# Altium footprint library standard-case.PcbLib: 285 footprints (part 10 of 18)
Each footprint in its own frame and in the unit in brackets; x right, y up, seen from the top. Pads: shape width x height; smd on the part's side, far side on the other; paste and mask are expansions set on the pad; w line width, h text height; cw(c..) or ccw(c..) is an arc to the next point about the centre after c.
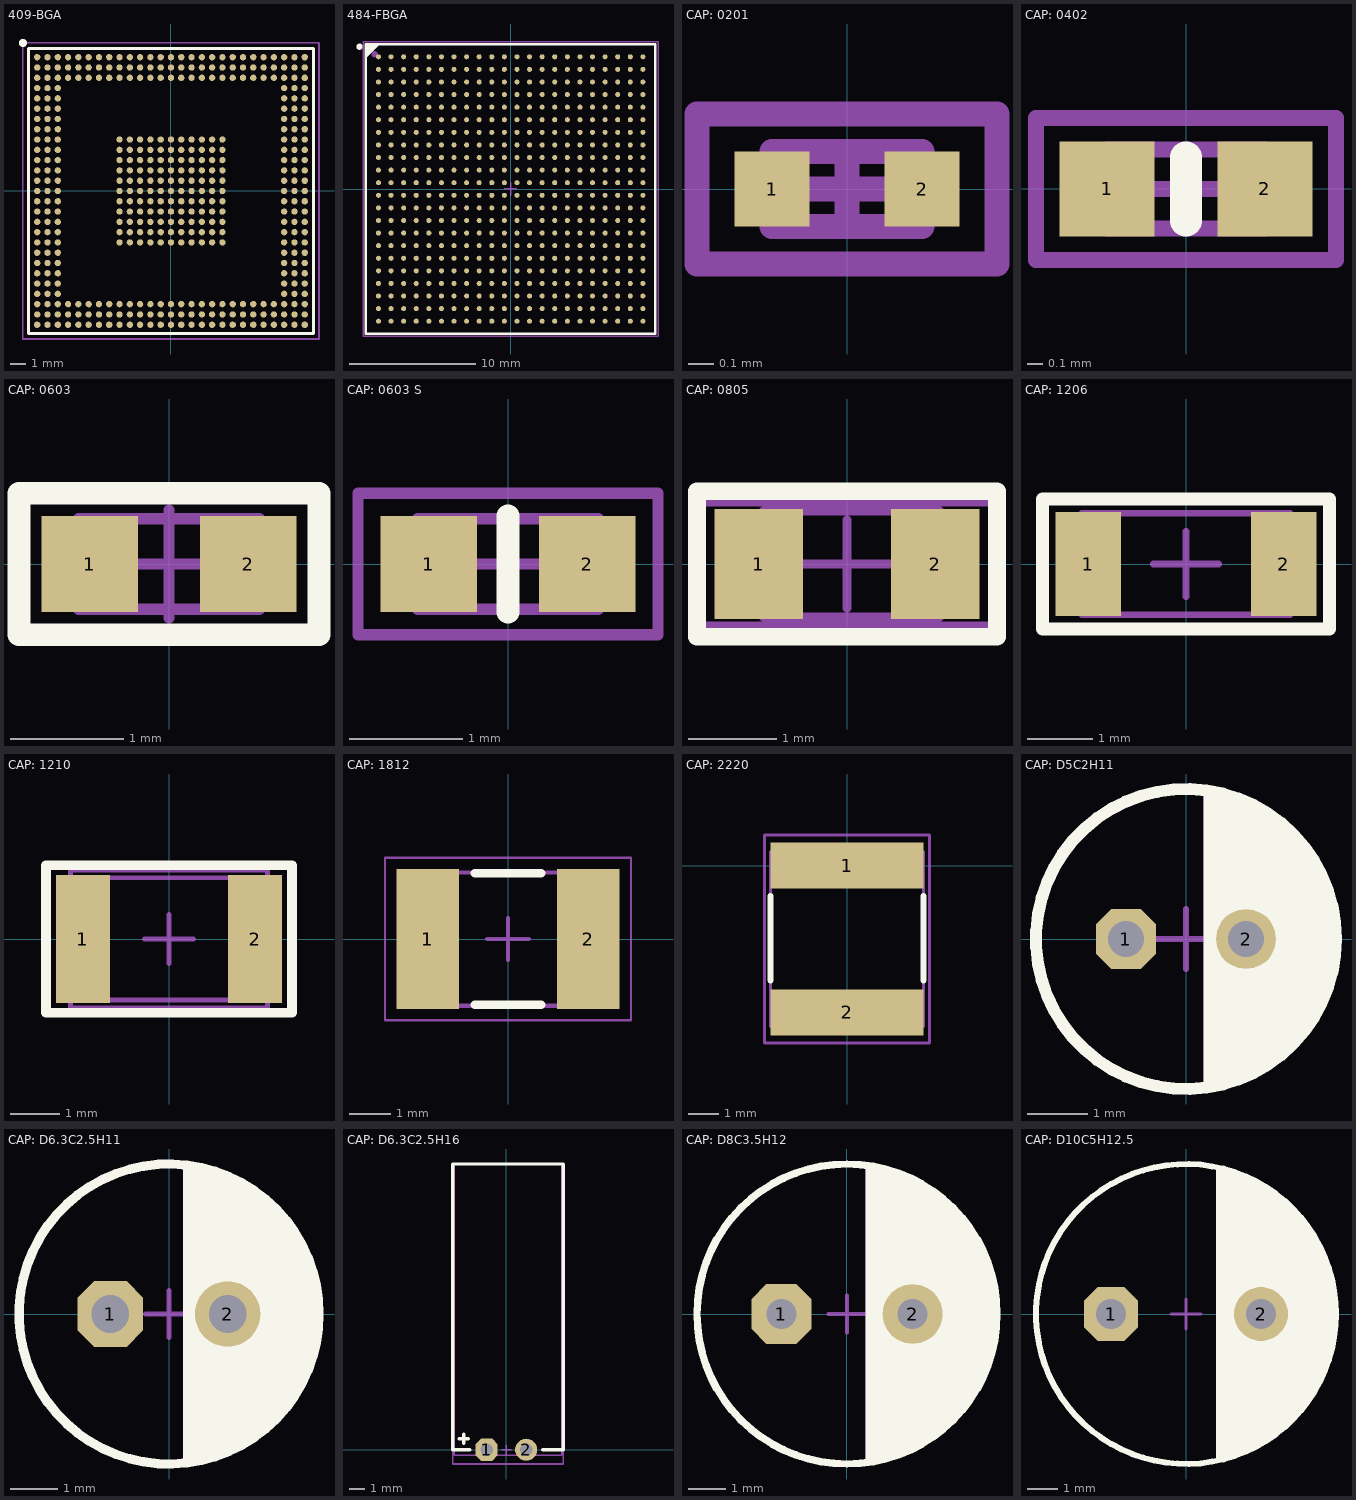
[diagram p9: the footprints below, top view; thin cyan lines are the x and y axes]

## 409-BGA [mm] "pitch 0.65 mm"
height 1.2
pads (410):
  round 0.4 smd: A1(-8.45,8.45) A2(-7.8,8.45) A3(-7.15,8.45) A4(-6.5,8.45) A5(-5.85,8.45) A6(-5.2,8.45) A7(-4.55,8.45) A8(-3.9,8.45) A9(-3.25,8.45) A10(-2.6,8.45) A11(-1.95,8.45) A12(-1.3,8.45) A13(-0.65,8.45) A14(0,8.45) A15(0.65,8.45) A16(1.3,8.45) A17(1.95,8.45) A18(2.6,8.45) A19(3.25,8.45) A20(3.9,8.45) A21(4.55,8.45) A22(5.2,8.45) A23(5.85,8.45) A24(6.5,8.45) A25(7.15,8.45) A26(7.8,8.45) A27(8.45,8.45) AA1(-8.45,-4.55) AA2(-7.8,-4.55) AA3(-7.15,-4.55) AA25(7.15,-4.55) AA26(7.8,-4.55) AA27(8.45,-4.55) AB1(-8.45,-5.2) AB2(-7.8,-5.2) AB3(-7.15,-5.2) AB25(7.15,-5.2) AB26(7.8,-5.2) AB27(8.45,-5.2) AC1(-8.45,-5.85) AC2(-7.8,-5.85) AC3(-7.15,-5.85) AC25(7.15,-5.85) AC26(7.8,-5.85) AC27(8.45,-5.85) AD1(-8.45,-6.5) AD2(-7.8,-6.5) AD3(-7.15,-6.5) AD25(7.15,-6.5) AD26(7.8,-6.5) AD27(8.45,-6.5) AE1(-8.45,-7.15) AE2(-7.8,-7.15) AE3(-7.15,-7.15) AE4(-6.5,-7.15) AE5(-5.85,-7.15) AE6(-5.2,-7.15) AE7(-4.55,-7.15) AE8(-3.9,-7.15) AE9(-3.25,-7.15) AE10(-2.6,-7.15) AE11(-1.95,-7.15) AE12(-1.3,-7.15) AE13(-0.65,-7.15) AE14(0,-7.15) AE15(0.65,-7.15) AE16(1.3,-7.15) AE17(1.95,-7.15) AE18(2.6,-7.15) AE19(3.25,-7.15) AE20(3.9,-7.15) AE21(4.55,-7.15) AE22(5.2,-7.15) AE23(5.85,-7.15) AE24(6.5,-7.15) AE25(7.15,-7.15) AE26(7.8,-7.15) AE27(8.45,-7.15) AF1(-8.45,-7.8) AF2(-7.8,-7.8) AF3(-7.15,-7.8) AF4(-6.5,-7.8) AF5(-5.85,-7.8) AF6(-5.2,-7.8) AF7(-4.55,-7.8) AF8(-3.9,-7.8) AF9(-3.25,-7.8) AF10(-2.6,-7.8) AF11(-1.95,-7.8) AF12(-1.3,-7.8) AF13(-0.65,-7.8) AF14(0,-7.8) AF15(0.65,-7.8) AF16(1.3,-7.8) AF17(1.95,-7.8) AF18(2.6,-7.8) AF19(3.25,-7.8) AF20(3.9,-7.8) AF21(4.55,-7.8) AF22(5.2,-7.8) AF23(5.85,-7.8) AF24(6.5,-7.8) AF25(7.15,-7.8) AF26(7.8,-7.8) AF27(8.45,-7.8) AG1(-8.45,-8.45) AG2(-7.8,-8.45) AG3(-7.15,-8.45) AG4(-6.5,-8.45) AG5(-5.85,-8.45) AG6(-5.2,-8.45) AG7(-4.55,-8.45) AG8(-3.9,-8.45) AG9(-3.25,-8.45) AG10(-2.6,-8.45) AG11(-1.95,-8.45) AG12(-1.3,-8.45) AG13(-0.65,-8.45) AG14(0,-8.45) AG15(0.65,-8.45) AG16(1.3,-8.45) AG17(1.95,-8.45) AG18(2.6,-8.45) AG19(3.25,-8.45) AG20(3.9,-8.45) AG21(4.55,-8.45) AG22(5.2,-8.45) AG23(5.85,-8.45) AG24(6.5,-8.45) AG25(7.15,-8.45) AG26(7.8,-8.45) AG27(8.45,-8.45) B1(-8.45,7.8) B2(-7.8,7.8) B3(-7.15,7.8) B4(-6.5,7.8) B5(-5.85,7.8) B6(-5.2,7.8) B7(-4.55,7.8) B8(-3.9,7.8) B9(-3.25,7.8) B10(-2.6,7.8) B11(-1.95,7.8) B12(-1.3,7.8) B13(-0.65,7.8) B14(0,7.8) B15(0.65,7.8) B16(1.3,7.8) B17(1.95,7.8) B18(2.6,7.8) B19(3.25,7.8) B20(3.9,7.8) B21(4.55,7.8) B22(5.2,7.8) B23(5.85,7.8) B24(6.5,7.8) B25(7.15,7.8) B26(7.8,7.8) B27(8.45,7.8) C1(-8.45,7.15) C2(-7.8,7.15) C3(-7.15,7.15) C4(-6.5,7.15) C5(-5.85,7.15) C6(-5.2,7.15) C7(-4.55,7.15) C8(-3.9,7.15) C9(-3.25,7.15) C10(-2.6,7.15) C11(-1.95,7.15) C12(-1.3,7.15) C13(-0.65,7.15) C14(0,7.15) C15(0.65,7.15) C16(1.3,7.15) C17(1.95,7.15) C18(2.6,7.15) C19(3.25,7.15) C20(3.9,7.15) C21(4.55,7.15) C22(5.2,7.15) C23(5.85,7.15) C24(6.5,7.15) C25(7.15,7.15) C26(7.8,7.15) C27(8.45,7.15) D1(-8.45,6.5) D2(-7.8,6.5) D3(-7.15,6.5) D25(7.15,6.5) D26(7.8,6.5) D27(8.45,6.5) E1(-8.45,5.85) E2(-7.8,5.85) E3(-7.15,5.85) E25(7.15,5.85) E26(7.8,5.85) E27(8.45,5.85) F1(-8.45,5.2) F2(-7.8,5.2) F3(-7.15,5.2) F25(7.15,5.2) F26(7.8,5.2) F27(8.45,5.2) G1(-8.45,4.55) G2(-7.8,4.55) G3(-7.15,4.55) G25(7.15,4.55) G26(7.8,4.55) G27(8.45,4.55) H1(-8.45,3.9) H2(-7.8,3.9) H3(-7.15,3.9) H25(7.15,3.9) H26(7.8,3.9) H27(8.45,3.9) J1(-8.45,3.25) J2(-7.8,3.25) J3(-7.15,3.25) J9(-3.25,3.25) J10(-2.6,3.25) J11(-1.95,3.25) J12(-1.3,3.25) J13(-0.65,3.25) J14(0,3.25) J15(0.65,3.25) J16(1.3,3.25) J17(1.95,3.25) J18(2.6,3.25) J19(3.25,3.25) J25(7.15,3.25) J26(7.8,3.25) J27(8.45,3.25) K1(-8.45,2.6) K2(-7.8,2.6) K3(-7.15,2.6) K9(-3.25,2.6) K10(-2.6,2.6) K11(-1.95,2.6) K12(-1.3,2.6) K13(-0.65,2.6) K14(0,2.6) K15(0.65,2.6) K16(1.3,2.6) K17(1.95,2.6) K18(2.6,2.6) K19(3.25,2.6) K25(7.15,2.6) K26(7.8,2.6) K27(8.45,2.6) L1(-8.45,1.95) L2(-7.8,1.95) L3(-7.15,1.95) L9(-3.25,1.95) L10(-2.6,1.95) L11(-1.95,1.95) L12(-1.3,1.95) L13(-0.65,1.95) L14(0,1.95) L15(0.65,1.95) L16(1.3,1.95) L17(1.95,1.95) L18(2.6,1.95) L19(3.25,1.95) L25(7.15,1.95) L26(7.8,1.95) L27(8.45,1.95) M1(-8.45,1.3) M2(-7.8,1.3) M3(-7.15,1.3) M9(-3.25,1.3) M10(-2.6,1.3) M11(-1.95,1.3) M12(-1.3,1.3) M13(-0.65,1.3) M14(0,1.3) M15(0.65,1.3) M16(1.3,1.3) M17(1.95,1.3) M18(2.6,1.3) M19(3.25,1.3) M25(7.15,1.3) M26(7.8,1.3) M27(8.45,1.3) N1(-8.45,0.65) N2(-7.8,0.65) N3(-7.15,0.65) N9(-3.25,0.65) N10(-2.6,0.65) N11(-1.95,0.65) N12(-1.3,0.65) N13(-0.65,0.65) N14(0,0.65) N15(0.65,0.65) N16(1.3,0.65) N17(1.95,0.65) N18(2.6,0.65) N19(3.25,0.65) N25(7.15,0.65) N26(7.8,0.65) N27(8.45,0.65) P1(-8.45,0) P2(-7.8,0) P3(-7.15,0) P9(-3.25,0) P10(-2.6,0) P11(-1.95,0) P12(-1.3,0) P13(-0.65,0) P14(0,0) P15(0.65,0) P16(1.3,0) P17(1.95,0) P18(2.6,0) P19(3.25,0) P25(7.15,0) P26(7.8,0) P27(8.45,0) R1(-8.45,-0.65) R2(-7.8,-0.65) R3(-7.15,-0.65) R9(-3.25,-0.65) R10(-2.6,-0.65) R11(-1.95,-0.65) R12(-1.3,-0.65) R13(-0.65,-0.65) R14(0,-0.65) R15(0.65,-0.65) R16(1.3,-0.65) R17(1.95,-0.65) R18(2.6,-0.65) R19(3.25,-0.65) R25(7.15,-0.65) R26(7.8,-0.65) R27(8.45,-0.65) T1(-8.45,-1.3) T2(-7.8,-1.3) T3(-7.15,-1.3) T9(-3.25,-1.3) T10(-2.6,-1.3) T11(-1.95,-1.3) T12(-1.3,-1.3) T13(-0.65,-1.3) T14(0,-1.3) T15(0.65,-1.3) T16(1.3,-1.3) T17(1.95,-1.3) T18(2.6,-1.3) T19(3.25,-1.3) T25(7.15,-1.3) T26(7.8,-1.3) T27(8.45,-1.3) U1(-8.45,-1.95) U2(-7.8,-1.95) U3(-7.15,-1.95) U9(-3.25,-1.95) U10(-2.6,-1.95) U11(-1.95,-1.95) U12(-1.3,-1.95) U13(-0.65,-1.95) U14(0,-1.95) U15(0.65,-1.95) U16(1.3,-1.95) U17(1.95,-1.95) U18(2.6,-1.95) U19(3.25,-1.95) U25(7.15,-1.95) U26(7.8,-1.95) U27(8.45,-1.95) V1(-8.45,-2.6) V2(-7.8,-2.6) V3(-7.15,-2.6) V9(-3.25,-2.6) V10(-2.6,-2.6) V11(-1.95,-2.6) V12(-1.3,-2.6) V13(-0.65,-2.6) V14(0,-2.6) V15(0.65,-2.6) V16(1.3,-2.6) V17(1.95,-2.6) V18(2.6,-2.6) V19(3.25,-2.6) V25(7.15,-2.6) V26(7.8,-2.6) V27(8.45,-2.6) W1(-8.45,-3.25) W2(-7.8,-3.25) W3(-7.15,-3.25) W9(-3.25,-3.25) W10(-2.6,-3.25) W11(-1.95,-3.25) W12(-1.3,-3.25) W13(-0.65,-3.25) W14(0,-3.25) W15(0.65,-3.25) W16(1.3,-3.25) W17(1.95,-3.25) W18(2.6,-3.25) W19(3.25,-3.25) W25(7.15,-3.25) W26(7.8,-3.25) W27(8.45,-3.25) Y1(-8.45,-3.9) Y2(-7.8,-3.9) Y3(-7.15,-3.9) Y25(7.15,-3.9) Y26(7.8,-3.9) Y27(8.45,-3.9)
  round 0.5 on Mech1: ""(-9.35,9.35)
Top Overlay:
  circle w0.25: c-9.35,9.35 r0.125
  lines w0.2: -9,-9 9,-9 9,9 -9,9 -9,-9
Mechanical 1:
  lines w0.127: -9,-9 -9,9 9,9 9,-9 -9,-9
Mechanical 13:
  lines w0.127: -9,-9 -9,9 9,9 9,-9 -9,-9
Mechanical 15:
  lines w0.1: -9.35,-9.35 9.35,-9.35 9.35,9.35 -9.35,9.35 -9.35,-9.35
3D body "AR9344.STEP": height 1.2, standoff 0, extent -9,-9 9,9

## 484-FBGA [mm] "pitch 1 mm"
height 2.4
pads (485):
  round 0.4 smd: A1(-10.5,10.5) A2(-9.5,10.5) A3(-8.5,10.5) A4(-7.5,10.5) A5(-6.5,10.5) A6(-5.5,10.5) A7(-4.5,10.5) A8(-3.5,10.5) A9(-2.5,10.5) A10(-1.5,10.5) A11(-0.5,10.5) A12(0.5,10.5) A13(1.5,10.5) A14(2.5,10.5) A15(3.5,10.5) A16(4.5,10.5) A17(5.5,10.5) A18(6.5,10.5) A19(7.5,10.5) A20(8.5,10.5) A21(9.5,10.5) A22(10.5,10.5) AA1(-10.5,-9.5) AA2(-9.5,-9.5) AA3(-8.5,-9.5) AA4(-7.5,-9.5) AA5(-6.5,-9.5) AA6(-5.5,-9.5) AA7(-4.5,-9.5) AA8(-3.5,-9.5) AA9(-2.5,-9.5) AA10(-1.5,-9.5) AA11(-0.5,-9.5) AA12(0.5,-9.5) AA13(1.5,-9.5) AA14(2.5,-9.5) AA15(3.5,-9.5) AA16(4.5,-9.5) AA17(5.5,-9.5) AA18(6.5,-9.5) AA19(7.5,-9.5) AA20(8.5,-9.5) AA21(9.5,-9.5) AA22(10.5,-9.5) AB1(-10.5,-10.5) AB2(-9.5,-10.5) AB3(-8.5,-10.5) AB4(-7.5,-10.5) AB5(-6.5,-10.5) AB6(-5.5,-10.5) AB7(-4.5,-10.5) AB8(-3.5,-10.5) AB9(-2.5,-10.5) AB10(-1.5,-10.5) AB11(-0.5,-10.5) AB12(0.5,-10.5) AB13(1.5,-10.5) AB14(2.5,-10.5) AB15(3.5,-10.5) AB16(4.5,-10.5) AB17(5.5,-10.5) AB18(6.5,-10.5) AB19(7.5,-10.5) AB20(8.5,-10.5) AB21(9.5,-10.5) AB22(10.5,-10.5) B1(-10.5,9.5) B2(-9.5,9.5) B3(-8.5,9.5) B4(-7.5,9.5) B5(-6.5,9.5) B6(-5.5,9.5) B7(-4.5,9.5) B8(-3.5,9.5) B9(-2.5,9.5) B10(-1.5,9.5) B11(-0.5,9.5) B12(0.5,9.5) B13(1.5,9.5) B14(2.5,9.5) B15(3.5,9.5) B16(4.5,9.5) B17(5.5,9.5) B18(6.5,9.5) B19(7.5,9.5) B20(8.5,9.5) B21(9.5,9.5) B22(10.5,9.5) C1(-10.5,8.5) C2(-9.5,8.5) C3(-8.5,8.5) C4(-7.5,8.5) C5(-6.5,8.5) C6(-5.5,8.5) C7(-4.5,8.5) C8(-3.5,8.5) C9(-2.5,8.5) C10(-1.5,8.5) C11(-0.5,8.5) C12(0.5,8.5) C13(1.5,8.5) C14(2.5,8.5) C15(3.5,8.5) C16(4.5,8.5) C17(5.5,8.5) C18(6.5,8.5) C19(7.5,8.5) C20(8.5,8.5) C21(9.5,8.5) C22(10.5,8.5) D1(-10.5,7.5) D2(-9.5,7.5) D3(-8.5,7.5) D4(-7.5,7.5) D5(-6.5,7.5) D6(-5.5,7.5) D7(-4.5,7.5) D8(-3.5,7.5) D9(-2.5,7.5) D10(-1.5,7.5) D11(-0.5,7.5) D12(0.5,7.5) D13(1.5,7.5) D14(2.5,7.5) D15(3.5,7.5) D16(4.5,7.5) D17(5.5,7.5) D18(6.5,7.5) D19(7.5,7.5) D20(8.5,7.5) D21(9.5,7.5) D22(10.5,7.5) E1(-10.5,6.5) E2(-9.5,6.5) E3(-8.5,6.5) E4(-7.5,6.5) E5(-6.5,6.5) E6(-5.5,6.5) E7(-4.5,6.5) E8(-3.5,6.5) E9(-2.5,6.5) E10(-1.5,6.5) E11(-0.5,6.5) E12(0.5,6.5) E13(1.5,6.5) E14(2.5,6.5) E15(3.5,6.5) E16(4.5,6.5) E17(5.5,6.5) E18(6.5,6.5) E19(7.5,6.5) E20(8.5,6.5) E21(9.5,6.5) E22(10.5,6.5) F1(-10.5,5.5) F2(-9.5,5.5) F3(-8.5,5.5) F4(-7.5,5.5) F5(-6.5,5.5) F6(-5.5,5.5) F7(-4.5,5.5) F8(-3.5,5.5) F9(-2.5,5.5) F10(-1.5,5.5) F11(-0.5,5.5) F12(0.5,5.5) F13(1.5,5.5) F14(2.5,5.5) F15(3.5,5.5) F16(4.5,5.5) F17(5.5,5.5) F18(6.5,5.5) F19(7.5,5.5) F20(8.5,5.5) F21(9.5,5.5) F22(10.5,5.5) G1(-10.5,4.5) G2(-9.5,4.5) G3(-8.5,4.5) G4(-7.5,4.5) G5(-6.5,4.5) G6(-5.5,4.5) G7(-4.5,4.5) G8(-3.5,4.5) G9(-2.5,4.5) G10(-1.5,4.5) G11(-0.5,4.5) G12(0.5,4.5) G13(1.5,4.5) G14(2.5,4.5) G15(3.5,4.5) G16(4.5,4.5) G17(5.5,4.5) G18(6.5,4.5) G19(7.5,4.5) G20(8.5,4.5) G21(9.5,4.5) G22(10.5,4.5) H1(-10.5,3.5) H2(-9.5,3.5) H3(-8.5,3.5) H4(-7.5,3.5) H5(-6.5,3.5) H6(-5.5,3.5) H7(-4.5,3.5) H8(-3.5,3.5) H9(-2.5,3.5) H10(-1.5,3.5) H11(-0.5,3.5) H12(0.5,3.5) H13(1.5,3.5) H14(2.5,3.5) H15(3.5,3.5) H16(4.5,3.5) H17(5.5,3.5) H18(6.5,3.5) H19(7.5,3.5) H20(8.5,3.5) H21(9.5,3.5) H22(10.5,3.5) J1(-10.5,2.5) J2(-9.5,2.5) J3(-8.5,2.5) J4(-7.5,2.5) J5(-6.5,2.5) J6(-5.5,2.5) J7(-4.5,2.5) J8(-3.5,2.5) J9(-2.5,2.5) J10(-1.5,2.5) J11(-0.5,2.5) J12(0.5,2.5) J13(1.5,2.5) J14(2.5,2.5) J15(3.5,2.5) J16(4.5,2.5) J17(5.5,2.5) J18(6.5,2.5) J19(7.5,2.5) J20(8.5,2.5) J21(9.5,2.5) J22(10.5,2.5) K1(-10.5,1.5) K2(-9.5,1.5) K3(-8.5,1.5) K4(-7.5,1.5) K5(-6.5,1.5) K6(-5.5,1.5) K7(-4.5,1.5) K8(-3.5,1.5) K9(-2.5,1.5) K10(-1.5,1.5) K11(-0.5,1.5) K12(0.5,1.5) K13(1.5,1.5) K14(2.5,1.5) K15(3.5,1.5) K16(4.5,1.5) K17(5.5,1.5) K18(6.5,1.5) K19(7.5,1.5) K20(8.5,1.5) K21(9.5,1.5) K22(10.5,1.5) L1(-10.5,0.5) L2(-9.5,0.5) L3(-8.5,0.5) L4(-7.5,0.5) L5(-6.5,0.5) L6(-5.5,0.5) L7(-4.5,0.5) L8(-3.5,0.5) L9(-2.5,0.5) L10(-1.5,0.5) L11(-0.5,0.5) L12(0.5,0.5) L13(1.5,0.5) L14(2.5,0.5) L15(3.5,0.5) L16(4.5,0.5) L17(5.5,0.5) L18(6.5,0.5) L19(7.5,0.5) L20(8.5,0.5) L21(9.5,0.5) L22(10.5,0.5) M1(-10.5,-0.5) M2(-9.5,-0.5) M3(-8.5,-0.5) M4(-7.5,-0.5) M5(-6.5,-0.5) M6(-5.5,-0.5) M7(-4.5,-0.5) M8(-3.5,-0.5) M9(-2.5,-0.5) M10(-1.5,-0.5) M11(-0.5,-0.5) M12(0.5,-0.5) M13(1.5,-0.5) M14(2.5,-0.5) M15(3.5,-0.5) M16(4.5,-0.5) M17(5.5,-0.5) M18(6.5,-0.5) M19(7.5,-0.5) M20(8.5,-0.5) M21(9.5,-0.5) M22(10.5,-0.5) N1(-10.5,-1.5) N2(-9.5,-1.5) N3(-8.5,-1.5) N4(-7.5,-1.5) N5(-6.5,-1.5) N6(-5.5,-1.5) N7(-4.5,-1.5) N8(-3.5,-1.5) N9(-2.5,-1.5) N10(-1.5,-1.5) N11(-0.5,-1.5) N12(0.5,-1.5) N13(1.5,-1.5) N14(2.5,-1.5) N15(3.5,-1.5) N16(4.5,-1.5) N17(5.5,-1.5) N18(6.5,-1.5) N19(7.5,-1.5) N20(8.5,-1.5) N21(9.5,-1.5) N22(10.5,-1.5) P1(-10.5,-2.5) P2(-9.5,-2.5) P3(-8.5,-2.5) P4(-7.5,-2.5) P5(-6.5,-2.5) P6(-5.5,-2.5) P7(-4.5,-2.5) P8(-3.5,-2.5) P9(-2.5,-2.5) P10(-1.5,-2.5) P11(-0.5,-2.5) P12(0.5,-2.5) P13(1.5,-2.5) P14(2.5,-2.5) P15(3.5,-2.5) P16(4.5,-2.5) P17(5.5,-2.5) P18(6.5,-2.5) P19(7.5,-2.5) P20(8.5,-2.5) P21(9.5,-2.5) P22(10.5,-2.5) R1(-10.5,-3.5) R2(-9.5,-3.5) R3(-8.5,-3.5) R4(-7.5,-3.5) R5(-6.5,-3.5) R6(-5.5,-3.5) R7(-4.5,-3.5) R8(-3.5,-3.5) R9(-2.5,-3.5) R10(-1.5,-3.5) R11(-0.5,-3.5) R12(0.5,-3.5) R13(1.5,-3.5) R14(2.5,-3.5) R15(3.5,-3.5) R16(4.5,-3.5) R17(5.5,-3.5) R18(6.5,-3.5) R19(7.5,-3.5) R20(8.5,-3.5) R21(9.5,-3.5) R22(10.5,-3.5) T1(-10.5,-4.5) T2(-9.5,-4.5) T3(-8.5,-4.5) T4(-7.5,-4.5) T5(-6.5,-4.5) T6(-5.5,-4.5) T7(-4.5,-4.5) T8(-3.5,-4.5) T9(-2.5,-4.5) T10(-1.5,-4.5) T11(-0.5,-4.5) T12(0.5,-4.5) T13(1.5,-4.5) T14(2.5,-4.5) T15(3.5,-4.5) T16(4.5,-4.5) T17(5.5,-4.5) T18(6.5,-4.5) T19(7.5,-4.5) T20(8.5,-4.5) T21(9.5,-4.5) T22(10.5,-4.5) U1(-10.5,-5.5) U2(-9.5,-5.5) U3(-8.5,-5.5) U4(-7.5,-5.5) U5(-6.5,-5.5) U6(-5.5,-5.5) U7(-4.5,-5.5) U8(-3.5,-5.5) U9(-2.5,-5.5) U10(-1.5,-5.5) U11(-0.5,-5.5) U12(0.5,-5.5) U13(1.5,-5.5) U14(2.5,-5.5) U15(3.5,-5.5) U16(4.5,-5.5) U17(5.5,-5.5) U18(6.5,-5.5) U19(7.5,-5.5) U20(8.5,-5.5) U21(9.5,-5.5) U22(10.5,-5.5) V1(-10.5,-6.5) V2(-9.5,-6.5) V3(-8.5,-6.5) V4(-7.5,-6.5) V5(-6.5,-6.5) V6(-5.5,-6.5) V7(-4.5,-6.5) V8(-3.5,-6.5) V9(-2.5,-6.5) V10(-1.5,-6.5) V11(-0.5,-6.5) V12(0.5,-6.5) V13(1.5,-6.5) V14(2.5,-6.5) V15(3.5,-6.5) V16(4.5,-6.5) V17(5.5,-6.5) V18(6.5,-6.5) V19(7.5,-6.5) V20(8.5,-6.5) V21(9.5,-6.5) V22(10.5,-6.5) W1(-10.5,-7.5) W2(-9.5,-7.5) W3(-8.5,-7.5) W4(-7.5,-7.5) W5(-6.5,-7.5) W6(-5.5,-7.5) W7(-4.5,-7.5) W8(-3.5,-7.5) W9(-2.5,-7.5) W10(-1.5,-7.5) W11(-0.5,-7.5) W12(0.5,-7.5) W13(1.5,-7.5) W14(2.5,-7.5) W15(3.5,-7.5) W16(4.5,-7.5) W17(5.5,-7.5) W18(6.5,-7.5) W19(7.5,-7.5) W20(8.5,-7.5) W21(9.5,-7.5) W22(10.5,-7.5) Y1(-10.5,-8.5) Y2(-9.5,-8.5) Y3(-8.5,-8.5) Y4(-7.5,-8.5) Y5(-6.5,-8.5) Y6(-5.5,-8.5) Y7(-4.5,-8.5) Y8(-3.5,-8.5) Y9(-2.5,-8.5) Y10(-1.5,-8.5) Y11(-0.5,-8.5) Y12(0.5,-8.5) Y13(1.5,-8.5) Y14(2.5,-8.5) Y15(3.5,-8.5) Y16(4.5,-8.5) Y17(5.5,-8.5) Y18(6.5,-8.5) Y19(7.5,-8.5) Y20(8.5,-8.5) Y21(9.5,-8.5) Y22(10.5,-8.5)
  round 0.5 on Mech1: ""(-10.8,10.7)
Top Overlay:
  circle w0.25: c-12,11.3 r0.125
  region: -10.5,11.5 -11.5,10.5 -11.5,11.5
  lines w0.2: -11.5,10.5 -10.5,11.5 ; -11.5,-11.5 11.5,-11.5 11.5,11.5 -11.5,11.5 -11.5,-11.5
Mechanical 1:
  lines w0.1: -11.5,-11.5 11.5,-11.5 11.5,11.5 -11.5,11.5 -11.5,-11.5
Mechanical 13:
  lines w0.1: -11.5,-11.5 11.5,-11.5 11.5,11.5 -11.5,11.5 -11.5,-11.5
Mechanical 15:
  lines w0.1: -0.5,0 0.5,0 ; 0,-0.5 0,0.5 ; -11.7,-11.7 11.7,-11.7 11.7,11.7 -11.7,11.7 -11.7,-11.7
3D body "User Library-FBG484C.STEP": height 2.19, standoff -0.02, extent -11.5,-11.5 11.5,11.5

## CAP: 0201 [mm]
height 0.23
pads (2):
  rect 0.3x0.3 smd: 1(-0.3,0) 2(0.3,0)
Mechanical 1:
  lines w0.1: -0.3,-0.15 -0.3,0.15 0.3,0.15 0.3,-0.15 -0.3,-0.15
Mechanical 15:
  lines w0.1: -0.15,0 0.15,0 ; 0,-0.15 0,0.15 ; -0.6,-0.3 0.6,-0.3 0.6,0.3 -0.6,0.3 -0.6,-0.3
3D body "User Library-0201(0603M) Cap.STEP": height 0.31, standoff 0, extent -0.305,-0.152 0.305,0.152

## CAP: 0402 [mm]
height 0.35
pads (2):
  rect 0.6x0.6 smd: 1(-0.5,0) 2(0.5,0)
Top Overlay:
  lines w0.2: 0,-0.2 0,0.2
Mechanical 1:
  lines w0.1: -0.5,-0.25 -0.5,0.25 0.5,0.25 0.5,-0.25 -0.5,-0.25
Mechanical 15:
  lines w0.1: -0.25,0 0.25,0 ; 0,-0.25 0,0.25 ; -0.95,-0.45 -0.95,0.45 0.95,0.45 0.95,-0.45 -0.95,-0.45
3D body "User Library-0402(1005M) Cap.step": height 0.51, standoff 0, extent -0.508,-0.254 0.508,0.254
3D body "chip_0402_r.STEP": height 0.34, standoff -0.02, extent -0.525,-0.25 0.475,0.25

## CAP: 0603 [mm]
height 0.45
pads (2):
  rect 0.85x0.85 smd: 1(-0.7,0) 2(0.7,0)
Top Overlay:
  lines w0.2: -1.325,-0.625 1.325,-0.625 1.325,0.625 -1.325,0.625 -1.325,-0.625
Mechanical 1:
  lines w0.1: -0.8,-0.4 0.8,-0.4 0.8,0.4 -0.8,0.4 -0.8,-0.4
Mechanical 15:
  lines w0.1: -0.475,0 0.475,0 ; 0,-0.475 0,0.475 ; -1.325,-0.625 -1.325,0.625 1.325,0.625 1.325,-0.625 -1.325,-0.625
3D body "SW3dPS-0603 SMD Capacitor.STEP": height 0.3, standoff 0, extent -0.8,-0.4 0.8,0.4

## CAP: 0603 S [mm] "Reduced area for overlay"
height 0.45
pads (2):
  rect 0.85x0.85 smd: 1(-0.7,0) 2(0.7,0)
Top Overlay:
  lines w0.2: 0,-0.425 0,0.425
Mechanical 1:
  lines w0.1: -0.8,-0.4 -0.8,0.4 0.8,0.4 0.8,-0.4 -0.8,-0.4
Mechanical 15:
  lines w0.1: -0.475,0 0.475,0 ; 0,-0.475 0,0.475 ; -1.325,-0.625 1.325,-0.625 1.325,0.625 -1.325,0.625 -1.325,-0.625
3D body "SW3dPS-0603 SMD Capacitor.STEP": height 0.3, standoff 0, extent -0.8,-0.4 0.8,0.4

## CAP: 0805 [mm]
height 0.45
pads (2):
  rect 1x1.25 smd: 1(-1,0) 2(1,0)
Top Overlay:
  lines w0.2: -1.7,-0.825 1.7,-0.825 1.7,0.825 -1.7,0.825 -1.7,-0.825
Mechanical 1:
  lines w0.1: -0.949,-0.6 1.05,-0.6 1.05,0.6 -0.949,0.6 -0.949,-0.6
Mechanical 15:
  lines w0.1: -0.5,0 0.5,0 ; 0,-0.5 0,0.5 ; -1.7,-0.7 -1.7,0.7 1.7,0.7 1.7,-0.7 -1.7,-0.7
3D body "SW3dPS-0805 SMD Capacitor.STEP": height 0.78, standoff 0, extent -1,-0.625 1,0.625

## CAP: 1206 [mm]
height 0.6
pads (2):
  rect 1x1.6 smd: 1(-1.5,0) 2(1.5,0)
Top Overlay:
  lines w0.2: -2.2,-1 2.2,-1 2.2,1 -2.2,1 -2.2,-1
Mechanical 1:
  lines w0.1: -1.6,-0.775 1.6,-0.775 1.6,0.775 -1.6,0.775 -1.6,-0.775
Mechanical 15:
  lines w0.1: -0.5,0 0.5,0 ; 0,-0.5 0,0.5 ; -2.2,-1 -2.2,1 2.2,1 2.2,-1 -2.2,-1
3D body "SW3dPS-1206 SMD Capacitor.STEP": height 1, standoff 0, extent -1.6,-0.8 1.6,0.8

## CAP: 1210 [mm]
height 2.5
pads (2):
  rect 1.1x2.6 smd: 1(-1.75,0) 2(1.75,0)
Top Overlay:
  lines w0.2: -2.5,-1.5 2.5,-1.5 2.5,1.5 -2.5,1.5 -2.5,-1.5
Mechanical 1:
  lines w0.1: -2,-1.244 -2,1.245 2,1.245 2,-1.244 -2,-1.244
Mechanical 15:
  lines w0.1: -0.5,0 0.5,0 ; 0,-0.5 0,0.5 ; -2,-1.4 2,-1.4 2,1.4 -2,1.4 -2,-1.4
3D body "User Library-1210(3225M) Cap.STEP": height 1.7, standoff 0, extent -2,-1.244 2,1.245

## CAP: 1812 [mm]
height 1.4
pads (2):
  rect 1.5x3.35 smd: 1(-1.925,0) 2(1.925,0)
Top Overlay:
  lines w0.2: -0.8,-1.575 0.8,-1.575 ; -0.8,1.575 0.8,1.575
Mechanical 1:
  lines w0.1: -2.25,-1.6 2.25,-1.6 2.25,1.6 -2.25,1.6 -2.25,-1.6
Mechanical 15:
  lines w0.05: -2.95,-1.95 2.95,-1.95 2.95,1.95 -2.95,1.95 -2.95,-1.95
  lines w0.1: -0.5,0 0.5,0 ; 0,-0.5 0,0.5
3D body "SW3dPS-1812 SMD Capacitor.STEP": height 1.6, standoff 0, extent -2.25,-1.6 2.25,1.6

## CAP: 2220 [mm]
pads (2):
  rect 5x1.5 smd: 1(0,0) 2(0,-4.8)
Top Overlay:
  lines w0.2: -2.5,-3.75 -2.5,-1 ; 2.5,-3.75 2.5,-1
Mechanical 1:
  lines w0.1: -2.5,-5.25 -2.5,0.45 2.5,0.45 2.5,-5.25 -2.5,-5.25
Mechanical 15:
  lines w0.1: -2.7,-5.8 2.7,-5.8 2.7,1 -2,1 -2.7,1 -2.7,-5.8
3D body "User Library-CAPC5750X23.STEP": height 2.3, standoff 0, extent -2.5,-5.25 2.5,0.45

## CAP: D5C2H11 [mm]
height 11
pads (2):
  oct 1x1 hole 0.6: 1(-1,0)
  round 1 hole 0.6: 2(1,0)
Top Overlay:
  circle w0.2: c0,0 r2.5
  region: 0.3,-2.5 0.3,2.5 0.975,2.3 1.575,1.95 1.925,1.6 2.175,1.225 2.45,0.575 2.5,0 2.425,-0.625 2.2,-1.225 1.725,-1.8 1.2,-2.2 0.7,-2.425 0.325,-2.5
Mechanical 1:
  circle w0.1: c0,0 r2.5
  region: 0.3,-2.5 0.3,2.5 0.975,2.3 1.575,1.95 1.925,1.6 2.175,1.225 2.45,0.575 2.5,0 2.425,-0.625 2.2,-1.225 1.725,-1.8 1.2,-2.2 0.7,-2.425 0.325,-2.5
Mechanical 15:
  circle w0.1: c0,0 r2.5
  lines w0.1: -0.5,0 0.5,0 ; 0,-0.5 0,0.5
3D body "User Library-CapAluRadial_D50H110.STEP": height 13.5, standoff -3, extent -2.75,-2.75 2.75,2.75

## CAP: D6.3C2.5H11 [mm]
height 11
pads (2):
  oct 1.4x1.4 hole 0.8: 1(-1.25,0)
  round 1.4 hole 0.8: 2(1.25,0)
Top Overlay:
  circle w0.2: c0,0 r3.2
  region: 0.3,-3.2 0.3,3.2 1.025,3.05 1.825,2.65 2.45,2.075 2.825,1.5 3.1,0.75 3.2,0 3.125,-0.65 2.925,-1.325 2.5,-2 1.975,-2.525 1.325,-2.9 0.675,-3.125
Mechanical 1:
  circle w0.1: c0,0 r3.2
  region: 0.3,-3.2 0.3,3.2 1.025,3.05 1.825,2.65 2.45,2.075 2.825,1.5 3.1,0.75 3.2,0 3.125,-0.65 2.925,-1.325 2.5,-2 1.975,-2.525 1.325,-2.9 0.675,-3.125
Mechanical 15:
  circle w0.1: c0,0 r3.2
  lines w0.1: -0.5,0 0.5,0 ; 0,-0.5 0,0.5
3D body "User Library-CapAluRadial_D63H110.STEP": height 12.5, standoff -3, extent -3.4,-3.399 3.4,3.399

## CAP: D6.3C2.5H16 [mm]
height 16
pads (2):
  oct 1.4x1.4 hole 0.8: 1(-1.25,0)
  round 1.4 hole 0.8: 2(1.25,0)
Top Overlay:
  lines w0.2: -3,0.7 -2.4,0.7 ; -2.7,0.4 -2.7,1 ; -2.3,0 -3.4,0 -3.4,18.1 3.6,18.1 3.6,0 2.3,0
Mechanical 1:
  lines w0.1: -3,0.7 -2.4,0.7 ; -2.7,0.4 -2.7,1
Mechanical 13:
  lines w0.1: -3.3,-0.334 3.5,-0.334 3.5,18.1 -3.3,18.1 -3.3,-0.334
Mechanical 15:
  lines w0.1: -0.3,0 0.3,0 ; 0,-0.3 0,0.3 ; -3.4,-0.9 -3.4,18.1 3.6,18.1 3.6,-0.9 -3.4,-0.9
3D body "D63H150.STEP": height 6.8, standoff -1.6, extent -3.3,-0.334 3.5,18.1

## CAP: D8C3.5H12 [mm]
height 12
pads (2):
  oct 1.6x1.6 hole 0.8: 1(-1.75,0)
  round 1.6 hole 0.8: 2(1.75,0)
Top Overlay:
  circle w0.2: c0,0 r4
  region: 0.5,-4 0.5,4 1.3,3.8 2.05,3.45 2.625,3 3.125,2.5 3.575,1.775 3.85,1.1 4,0.325 3.975,-0.425 3.85,-1.125 3.55,-1.85 3.2,-2.4 2.7,-2.95 2.125,-3.375 1.225,-3.8
Mechanical 1:
  circle w0.1: c0,0 r4
  region: 0.5,-4 0.5,4 1.3,3.8 2.05,3.45 2.625,3 3.125,2.5 3.575,1.775 3.85,1.1 4,0.325 3.975,-0.425 3.85,-1.125 3.55,-1.85 3.2,-2.4 2.7,-2.95 2.125,-3.375 1.225,-3.8
Mechanical 15:
  circle w0.1: c0,0 r4
  lines w0.1: -0.5,0 0.5,0 ; 0,-0.5 0,0.5
3D body "User Library-CapAluRadial_D80H115.STEP": height 13, standoff -3, extent -4.25,-4.247 4.25,4.247

## CAP: D10C5H12.5 [mm]
height 12.5
pads (2):
  oct 1.8x1.8 hole 1: 1(-2.5,0)
  round 1.8 hole 1: 2(2.5,0)
Top Overlay:
  circle w0.2: c0,0 r5
  region: 1,-4.9 1,4.9 2,4.6 3,4 3.7,3.4 4.529,2.157 4.752,1.667 5,0.3 4.853,-1.313 4.691,-1.882 4.2,-2.7 3.8,-3.2 3.4,-3.7 3,-4 2.4,-4.4 1.7,-4.7 1.1,-4.9
Mechanical 1:
  circle w0.1: c0,0 r5
  region: 1,-4.9 1,4.9 2,4.6 3,4 3.7,3.4 4.529,2.157 4.752,1.667 5,0.3 4.853,-1.313 4.691,-1.882 4.2,-2.7 3.8,-3.2 3.4,-3.7 3,-4 2.4,-4.4 1.7,-4.7 1.1,-4.9
Mechanical 15:
  circle w0.1: c0,0 r5
  lines w0.1: -0.5,0 0.5,0 ; 0,-0.5 0,0.5
3D body "User Library-CapAluRadial_D100H125.STEP": height 14.05, standoff -2.95, extent -5.25,-5.249 5.25,5.249